# Altium schematic symbol library AS5600.SchLib: 3 symbols
Pins are listed as number, name and electrical type; pins without a type are passive.

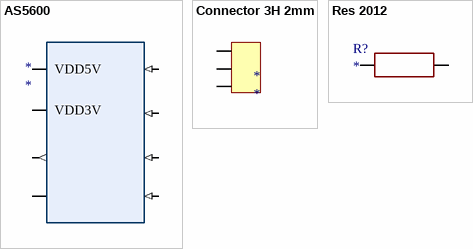
[diagram p0: symbols AS5600 to Res 2012]

## AS5600
designator *
footprint AS5600
pins: 1 VDD5V (power), 2 VDD3V (power), 3 OUT (out), 4 GND (power), 5 DIR (in), 6 SCL (in), 7 SDA (in), 8 GPO (in)

## Connector 3H 2mm
designator *
footprint Connector 3H 2mm
pins: 1, 2, 3

## Res 2012
designator R?
footprint Res2012
pins: 1, 2